# Altium schematic symbol library UJ20-C-V-SMT-TR-68.SchLib: 1 symbol
Pins are listed as number, name and electrical type; pins without a type are passive.

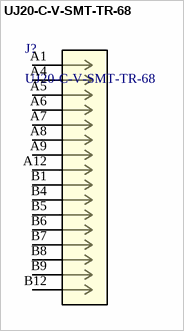
[diagram p0: symbol UJ20-C-V-SMT-TR-68]

## UJ20-C-V-SMT-TR-68
designator J?
No Description Available; Manufacturer_Name: Same Sky; Type: USB, DVI, HDMI, Connectors; Copyright: Copyright (C) 2026 Ultra Librarian. All rights reserved.; Manufacturer_Part_Number: UJ20-C-V-SMT-TR-68; RefDes: RefDes
footprint CONN_UJ20-C-V-SMT-TR-68_CUD
pins: A1, A4, A5, A6, A7, A8, A9, A12, B1, B4, B5, B6, B7, B8, B9, B12